# Altium footprint library ESP32WROOM32.PcbLib: 9 footprints
Each footprint in its own frame and in the unit in brackets; x right, y up, seen from the top. Pads: shape width x height; smd on the part's side, far side on the other; paste and mask are expansions set on the pad; w line width, h text height; cw(c..) or ccw(c..) is an arc to the next point about the centre after c.
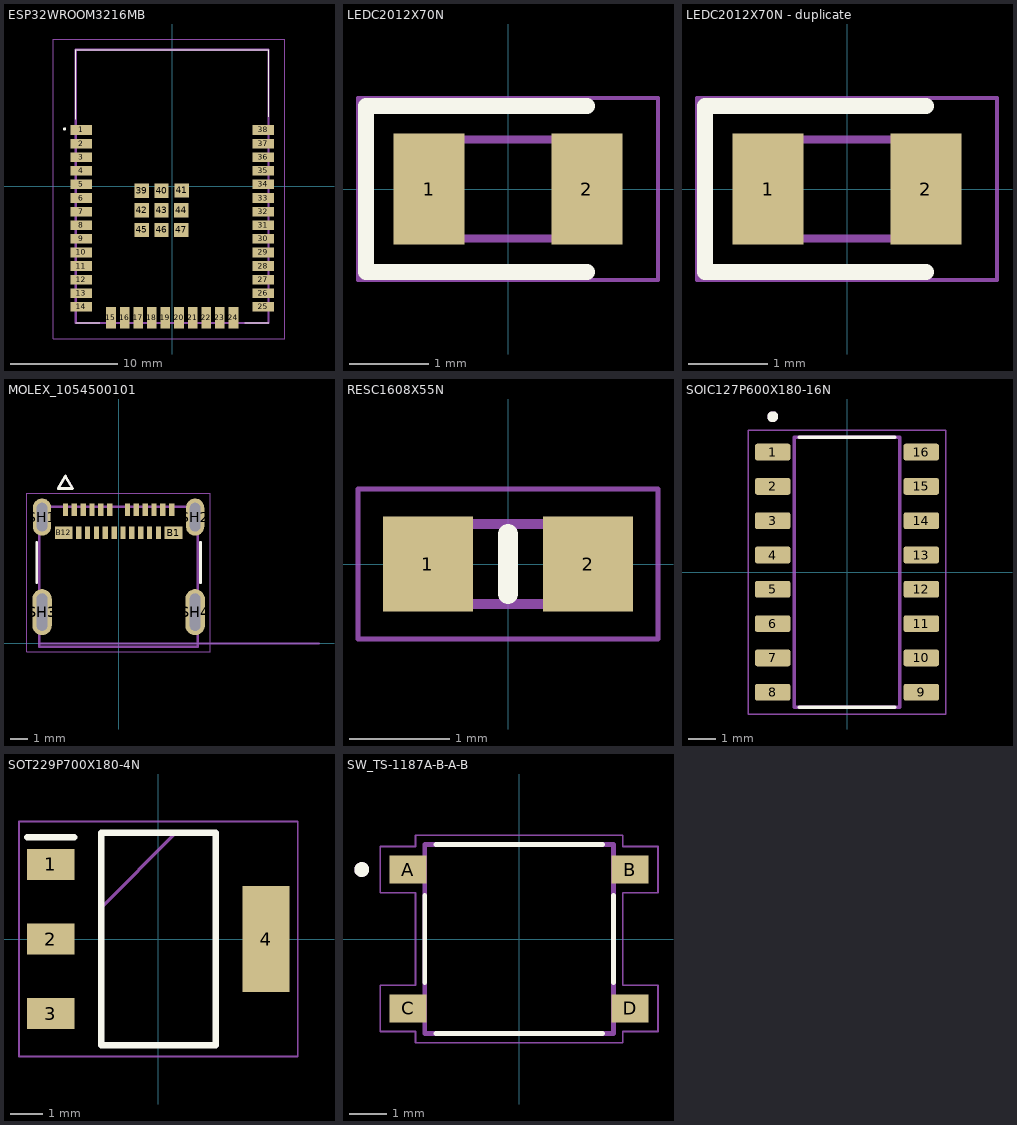
[diagram p0: the footprints below, top view; thin cyan lines are the x and y axes]

## ESP32WROOM3216MB [mm]
pads (47):
  rect 2x0.9 smd: 1(-8.5,5.26) 2(-8.5,3.99) 3(-8.5,2.72) 4(-8.5,1.45) 5(-8.5,0.18) 6(-8.5,-1.09) 7(-8.5,-2.36) 8(-8.5,-3.63) 9(-8.5,-4.9) 10(-8.5,-6.17) 11(-8.5,-7.44) 12(-8.5,-8.71) 13(-8.5,-9.98) 14(-8.5,-11.25) 25(8.5,-11.25) 26(8.5,-9.98) 27(8.5,-8.71) 28(8.5,-7.44) 29(8.5,-6.17) 30(8.5,-4.9) 31(8.5,-3.63) 32(8.5,-2.36) 33(8.5,-1.09) 34(8.5,0.18) 35(8.5,1.45) 36(8.5,2.72) 37(8.5,3.99) 38(8.5,5.26)
  rect 0.9x2 smd: 15(-5.715,-12.25) 16(-4.445,-12.25) 17(-3.175,-12.25) 18(-1.905,-12.25) 19(-0.635,-12.25) 20(0.635,-12.25) 21(1.905,-12.25) 22(3.175,-12.25) 23(4.445,-12.25) 24(5.715,-12.25)
  rect 1.33x1.33 smd: 39(-2.835,-0.405) 40(-1,-0.405) 41(0.889,-0.381) 42(-2.835,-2.24) 43(-1,-2.24) 44(0.835,-2.24) 45(-2.835,-4.075) 46(-1,-4.075) 47(0.835,-4.075)
Top Overlay:
  lines w0.1: -9,12.75 -9,6.25 -9,12.75 ; -9,12.75 9,12.75 ; -9,12.75 9,12.75 ; 9,12.75 9,6.5 9,12.75 ; -9,-12.75 -6.75,-12.75 -9,-12.75 ; 6.75,-12.75 9,-12.75 6.75,-12.75
  lines w0.2: -10.1,5.36 ccw(c-10.05,5.36) -10,5.36 ; -10.1,5.36 cw(c-10.05,5.36) -10,5.36 ; -10.1,5.36 ccw(c-10.05,5.36) -10,5.36
Mechanical 13:
  lines w0.2: -9,-12.75 9,-12.75 9,12.75 -9,12.75 -9,-12.75
Mechanical 15:
  lines w0.1: -11.1,-14.25 10.5,-14.25 10.5,13.75 -11.1,13.75 -11.1,-14.25
3D body "ESP32 - WROOM - 32.step": height 3.02, standoff 0.15, extent -9.017,-12.75 8.983,12.75

## LEDC2012X70N [mm]
pads (2):
  rect 0.9x1.4 smd: 1(-1,0) 2(1,0)
Top Overlay:
  lines w0.2: 1,-1.05 -1.8,-1.05 -1.8,1.05 1,1.05
Mechanical 13:
  lines w0.1: -1,0.208 -0.583,0.625 ; -1,-0.625 -1,0.625 1,0.625 1,-0.625 -1,-0.625
Mechanical 15:
  lines w0.05: -1.9,-1.15 -1.9,1.15 1.9,1.15 1.9,-1.15 -1.9,-1.15
3D body "SMD_0805LED_BLU.STEP": height 1.1, standoff 0, extent -0.982,-0.669 1.038,0.581

## LEDC2012X70N - duplicate [mm]
pads (2):
  rect 0.9x1.4 smd: 1(-1,0) 2(1,0)
Top Overlay:
  lines w0.2: 1,-1.05 -1.8,-1.05 -1.8,1.05 1,1.05
Mechanical 13:
  lines w0.1: -1,0.208 -0.583,0.625 ; -1,-0.625 -1,0.625 1,0.625 1,-0.625 -1,-0.625
Mechanical 15:
  lines w0.05: -1.9,-1.15 -1.9,1.15 1.9,1.15 1.9,-1.15 -1.9,-1.15
3D body "SMD_0805LED_RED.STEP": height 1.1, standoff 0, extent -0.982,-0.61 1.038,0.64

## MOLEX_1054500101 [mm]
height 3.24
pads (28):
  rect 0.298x0.7 smd mask+0.064: A1(-3,7.54) A2(-2.5,7.54) A3(-2,7.54) A4(-1.5,7.54) A5(-1,7.54) A6(-0.5,7.54) A7(0.5,7.54) A8(1,7.54) A9(1.5,7.54) A10(2,7.54) A11(2.5,7.54) A12(3,7.54) B2(2.25,6.24) B3(1.75,6.24) B4(1.25,6.24) B5(0.75,6.24) B6(0.25,6.24) B7(-0.25,6.24) B8(-0.75,6.24) B9(-1.25,6.24) B10(-1.75,6.24) B11(-2.25,6.24)
  rect 0.998x0.7 smd mask+0.064: B1(3.1,6.24) B12(-3.1,6.24)
  oval 1.036x2.1 hole 0.6 slot 1.6 at 90 deg mask+0.064: SH1(-4.32,7.13) SH2(4.32,7.13)
  oval 1.1x2.6 hole 0.6 slot 2.1 at 90 deg mask+0.064: SH3(-4.32,1.77) SH4(4.32,1.77)
Top Overlay:
  lines w0.15: -4.62,3.42 -4.62,5.72 ; 4.62,3.42 4.62,5.72 ; -3.4,8.748 -3,9.448 -2.6,8.748 -3.4,8.748
Mechanical 2:
  text "'.Designator'" at 0,4.484 h0.7
Mechanical 12:
  text "PTH2 Slot 2.10 +/- 0.05 X 0.60 +/- 0.05" at -5.84,11.907 h0.5
  text "PTH1 Slot 1.60 +/- 0.05 X 0.60 +/- 0.05" at -5.84,12.808 h0.5
Mechanical 13:
  lines w0.13: -4.47,0 4.47,0 ; 11.31,0 4.47,0 ; 4.47,0 4.47,7.72 -4.47,7.72 -4.47,-0.18 4.47,-0.18 4.47,0 ; -3.4,8.748 -3,9.448 -2.6,8.748 -3.4,8.748
  text "PCB Edge" at 5.4,0.27 h1
Mechanical 15:
  lines w0.01: -5.17,-0.48 -5.17,8.48 5.17,8.48 5.17,-0.48 -5.17,-0.48
3D body "105450-0101--3DModel-STEP-56544.STEP": height 3.2, standoff -0.9, extent -4.47,-0.095 4.47,7.805

## PCBComponent_1 [mm]

## RESC1608X55N [mm]
pads (2):
  rect 0.9x0.95 smd: 1(-0.8,0) 2(0.8,0)
Top Overlay:
  lines w0.2: 0,-0.3 0,0.3
Mechanical 13:
  lines w0.1: -0.8,-0.4 0.8,-0.4 0.8,0.4 -0.8,0.4 -0.8,-0.4
Mechanical 15:
  lines w0.05: -1.5,-0.75 1.5,-0.75 1.5,0.75 -1.5,0.75 -1.5,-0.75
3D body "R103_0603.stp": height 0.48, standoff 0, extent -0.775,-0.425 0.775,0.425

## SOIC127P600X180-16N [mm]
height 1.8
pads (16):
  rrect25% 1.31x0.62 smd: 1(-2.75,4.445) 2(-2.75,3.175) 3(-2.75,1.905) 4(-2.75,0.635) 5(-2.75,-0.635) 6(-2.75,-1.905) 7(-2.75,-3.175) 8(-2.75,-4.445) 9(2.75,-4.445) 10(2.75,-3.175) 11(2.75,-1.905) 12(2.75,-0.635) 13(2.75,0.635) 14(2.75,1.905) 15(2.75,3.175) 16(2.75,4.445)
Top Overlay:
  circle w0.2: c-2.75,5.755 r0.1
  lines w0.127: -1.775,-5 1.775,-5 -1.775,-5 ; -1.775,5 1.775,5 -1.775,5
Mechanical 13:
  circle w0.2: c-2.75,5.755 r0.1
  lines w0.127: -1.95,-5 -1.95,5 1.95,5 1.95,-5 -1.95,-5
Mechanical 15:
  lines w0.05: -3.655,-5.25 3.655,-5.25 3.655,5.25 -3.655,5.25 -3.655,-5.25
3D body "SOP127P660X265-16N.step": height 2.65, standoff 0, extent -3.275,-5.25 3.275,5.25

## SOT229P700X180-4N [mm]
pads (4):
  rect 1.45x0.95 smd: 1(-3.3,2.29) 2(-3.3,0) 3(-3.3,-2.29)
  rect 1.45x3.25 smd: 4(3.3,0)
Top Overlay:
  lines w0.2: -4.025,3.115 -2.575,3.115 ; -1.752,-3.252 1.752,-3.252 1.752,3.252 -1.752,3.252 -1.752,-3.252
Mechanical 13:
  lines w0.1: -1.752,0.962 0.538,3.252 ; -1.752,-3.252 1.752,-3.252 1.752,3.252 -1.752,3.252 -1.752,-3.252
Mechanical 15:
  lines w0.05: -4.275,-3.605 4.275,-3.605 4.275,3.605 -4.275,3.605 -4.275,-3.605
3D body "AMS1117 Sot 223.step": height 2, standoff -0.02, extent -3.712,-3.25 3.66,3.25

## SW_TS-1187A-B-A-B [mm]
pads (4):
  rect 1x0.75 smd: A(-3,1.875) B(3,1.875) C(-3,-1.875) D(3,-1.875)
Top Overlay:
  circle w0.2: c-4.25,1.875 r0.1
  lines w0.127: -2.55,-1.18 -2.55,1.18 ; -2.25,-2.55 2.25,-2.55 ; -2.25,2.55 2.25,2.55 ; 2.55,-1.18 2.55,1.18
Mechanical 13:
  circle w0.2: c-4.25,1.875 r0.1
  lines w0.127: -2.55,-2.55 2.55,-2.55 2.55,2.55 -2.55,2.55 -2.55,-2.55
Mechanical 15:
  lines w0.05: -3.75,-2.5 -2.8,-2.5 -2.8,-2.8 2.8,-2.8 2.8,-2.5 3.75,-2.5 3.75,-1.25 2.8,-1.25 2.8,1.25 3.75,1.25 3.75,2.5 2.8,2.5 2.8,2.8 -2.8,2.8 -2.8,2.5 -3.75,2.5 -3.75,1.25 -2.8,1.25 -2.8,-1.25 -3.75,-1.25 -3.75,-2.5
3D body "TS-1187A-B-A-B--3DModel-STEP-56544.STEP": height 1.55, standoff 0, extent -3.25,-2.55 3.25,2.55